# Altium footprint library Connector_FPC.PcbLib: 36 footprints (part 1 of 3)
Each footprint in its own frame and in the unit in brackets; x right, y up, seen from the top. Pads: shape width x height; smd on the part's side, far side on the other; paste and mask are expansions set on the pad; w line width, h text height; cw(c..) or ccw(c..) is an arc to the next point about the centre after c.
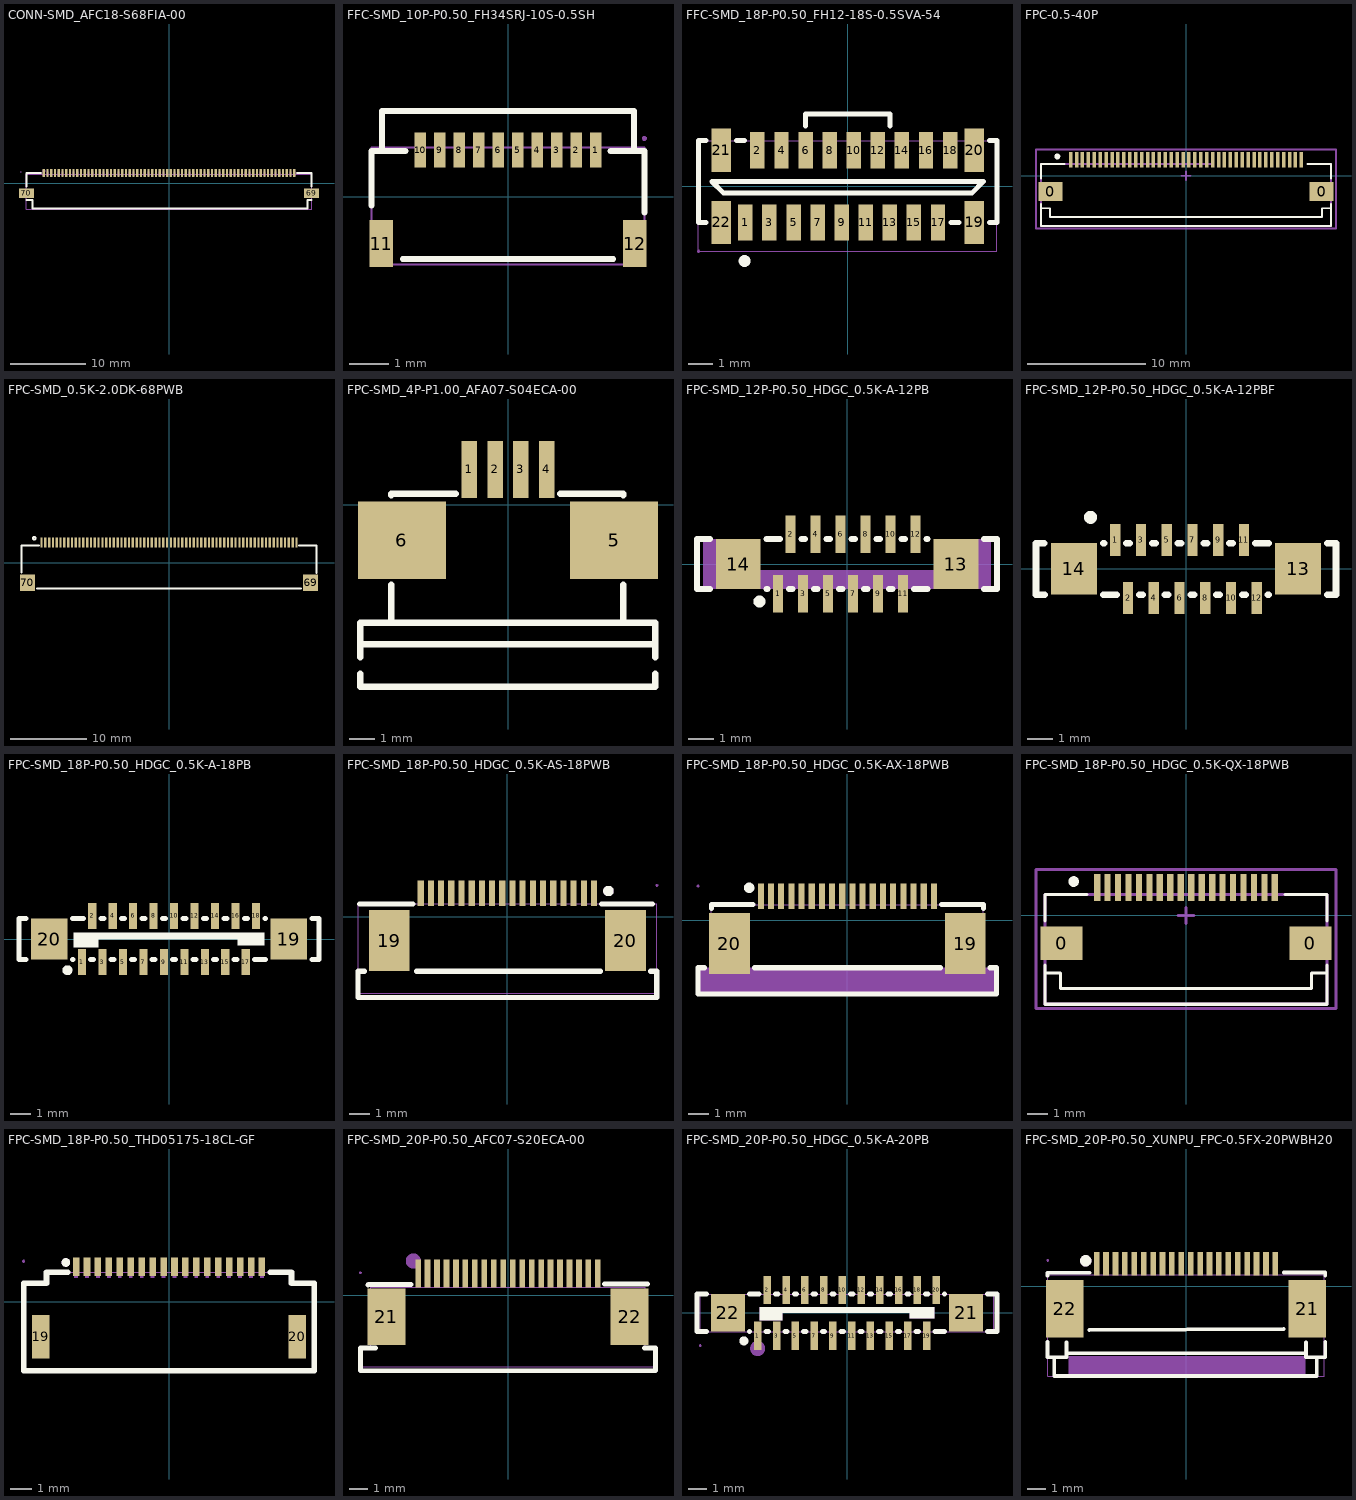
[diagram p0: the footprints below, top view; thin cyan lines are the x and y axes]

## CONN-SMD_AFC18-S68FIA-00 [mm]
pads (70):
  rect 0.3x1.1 smd paste+0 mask+0.05: 1(-16.75,1.35) 2(-16.25,1.35) 3(-15.75,1.35) 4(-15.25,1.35) 5(-14.75,1.35) 6(-14.25,1.35) 7(-13.75,1.35) 8(-13.25,1.35) 9(-12.75,1.35) 10(-12.25,1.35) 11(-11.75,1.35) 12(-11.25,1.35) 13(-10.75,1.35) 14(-10.25,1.35) 15(-9.75,1.35) 16(-9.25,1.35) 17(-8.75,1.35) 18(-8.25,1.35) 19(-7.75,1.35) 20(-7.25,1.35) 21(-6.75,1.35) 22(-6.25,1.35) 23(-5.75,1.35) 24(-5.25,1.35) 25(-4.75,1.35) 26(-4.25,1.35) 27(-3.75,1.35) 28(-3.25,1.35) 29(-2.75,1.35) 30(-2.25,1.35) 31(-1.75,1.35) 32(-1.25,1.35) 33(-0.75,1.35) 34(-0.25,1.35) 35(0.25,1.35) 36(0.75,1.35) 37(1.25,1.35) 38(1.75,1.35) 39(2.25,1.35) 40(2.75,1.35) 41(3.25,1.35) 42(3.75,1.35) 43(4.25,1.35) 44(4.75,1.35) 45(5.25,1.35) 46(5.75,1.35) 47(6.25,1.35) 48(6.75,1.35) 49(7.25,1.35) 50(7.75,1.35) 51(8.25,1.35) 52(8.75,1.35) 53(9.25,1.35) 54(9.75,1.35) 55(10.25,1.35) 56(10.75,1.35) 57(11.25,1.35) 58(11.75,1.35) 59(12.25,1.35) 60(12.75,1.35) 61(13.25,1.35) 62(13.75,1.35) 63(14.25,1.35) 64(14.75,1.35) 65(15.25,1.35) 66(15.75,1.35) 67(16.25,1.35) 68(16.75,1.35)
  rect 2x1.3 smd paste+0 mask+0.05: 69(19.05,-1.35) 70(-19.05,-1.35)
Top Overlay:
  lines w0.254: -19.05,-2.231 -18.25,-2.231 -18.25,-3.4 18.5,-3.4 18.5,-2.231 19.05,-2.231 ; -19.05,-0.469 -19.05,1.35 -17.131,1.35 ; 17.131,1.35 19.05,1.35 19.05,-0.469
Mechanical 2:
  circle w0.2: c-16.715,1.627 r0.1
Mechanical 5:
  lines w0.051: -19.05,-3.473 -19.05,1.187 19.05,1.187 19.05,-3.473 -19.05,-3.473
Mechanical 7:
  region: -19.764,1.487 -19.764,1.462 -19.8,1.427 -19.849,1.427 -19.884,1.462 -19.884,1.487 -19.884,1.512 -19.849,1.547 -19.8,1.547 -19.764,1.512 -19.764,1.487
Mechanical 8:
  drawing of 70 lines, arcs and shapes, not listed
3D body "1.step": height 1.78, standoff 0, extent -19.85,-3.455 19.85,1.505

## FFC-SMD_10P-P0.50_FH34SRJ-10S-0.5SH [mm]
pads (12):
  rect 0.3x0.9 smd: 1(2.25,1.2) 2(1.75,1.2) 3(1.25,1.2) 4(0.75,1.2) 5(0.25,1.2) 6(-0.25,1.2) 7(-0.75,1.2) 8(-1.25,1.2) 9(-1.75,1.2) 10(-2.25,1.2)
  rect 0.6x1.2 smd: 11(-3.25,-1.2) 12(3.25,-1.2)
Top Overlay:
  lines w0.15: -3.5,-0.224 -3.5,1.176 -2.631,1.176 ; -3.234,1.176 -3.234,2.2 3.234,2.2 3.234,1.176 ; -2.7,-1.6 2.7,-1.6 ; 2.631,1.176 3.5,1.176 3.5,-0.4
Mechanical 15:
  region: 3.56,1.5 3.56,1.475 3.525,1.44 3.475,1.44 3.44,1.475 3.44,1.5 3.44,1.525 3.475,1.56 3.525,1.56 3.56,1.525 3.56,1.5
  region: 3.15,-0.8 3.35,-0.8 3.35,-1.6 3.15,-1.6
  region: -3.35,-0.8 -3.15,-0.8 -3.15,-1.6 -3.35,-1.6
  region: -2.325,1.5 -2.175,1.5 -2.175,0.9 -2.325,0.9
  region: -1.825,1.5 -1.675,1.5 -1.675,0.9 -1.825,0.9
  region: -1.325,1.5 -1.175,1.5 -1.175,0.9 -1.325,0.9
  region: -0.825,1.5 -0.675,1.5 -0.675,0.9 -0.825,0.9
  region: -0.325,1.5 -0.175,1.5 -0.175,0.9 -0.325,0.9
  region: 0.175,1.5 0.325,1.5 0.325,0.9 0.175,0.9
  region: 0.675,1.5 0.825,1.5 0.825,0.9 0.675,0.9
  region: 1.175,1.5 1.325,1.5 1.325,0.9 1.175,0.9
  region: 1.675,1.5 1.825,1.5 1.825,0.9 1.675,0.9
  region: 2.175,1.5 2.325,1.5 2.325,0.9 2.175,0.9
  lines w0.051: -3.5,-1.74 -3.5,1.26 3.5,1.26 3.5,-1.74 -3.5,-1.74
3D body "1.step": height 1.45, standoff 0, extent -3.5,-1.7 3.5,1.5

## FFC-SMD_18P-P0.50_FH12-18S-0.5SVA-54 [mm]
pads (22):
  rect 0.6x1.5 smd mask+0.15: 1(-4.25,-1.5) 2(-3.75,1.5) 3(-3.25,-1.5) 4(-2.75,1.5) 5(-2.25,-1.5) 6(-1.75,1.5) 7(-1.25,-1.5) 8(-0.75,1.5) 9(-0.25,-1.5) 10(0.25,1.5) 11(0.75,-1.5) 12(1.25,1.5) 13(1.75,-1.5) 14(2.25,1.5) 15(2.75,-1.5) 16(3.25,1.5) 17(3.75,-1.5) 18(4.25,1.5)
  rect 0.8x1.8 smd mask+0.15: 19(5.25,-1.5) 20(5.25,1.5) 21(-5.25,1.5) 22(-5.25,-1.5)
Top Overlay:
  circle w0.254: c-4.281,-3.1 r0.119
  lines w0.203: -5.881,-1.5 -6.2,-1.5 -6.2,1.9 -5.881,1.9 ; -4.619,1.9 -4.281,1.9 ; -1.75,2.5 -1.75,3 1.75,3 1.75,2.5 ; 4.281,-1.5 4.619,-1.5 ; 5.881,-1.5 6.2,-1.5 6.2,1.9 5.881,1.9 ; -5.635,0.2 -5.165,-0.27 5.165,-0.27 5.635,0.2 -5.635,0.2
Mechanical 15:
  region: 4.325,1.05 4.175,1.05 4.175,1.9 4.325,1.9
  region: 3.825,-1.9 3.675,-1.9 3.675,-1.05 3.825,-1.05
  region: 3.325,1.05 3.175,1.05 3.175,1.9 3.325,1.9
  region: 2.825,-1.9 2.675,-1.9 2.675,-1.05 2.825,-1.05
  region: 2.325,1.05 2.175,1.05 2.175,1.9 2.325,1.9
  region: 1.825,-1.9 1.675,-1.9 1.675,-1.05 1.825,-1.05
  region: 1.325,1.05 1.175,1.05 1.175,1.9 1.325,1.9
  region: 0.825,-1.9 0.675,-1.9 0.675,-1.05 0.825,-1.05
  region: 0.325,1.05 0.175,1.05 0.175,1.9 0.325,1.9
  region: -0.175,-1.9 -0.325,-1.9 -0.325,-1.05 -0.175,-1.05
  region: -0.675,1.05 -0.825,1.05 -0.825,1.9 -0.675,1.9
  region: -1.175,-1.9 -1.325,-1.9 -1.325,-1.05 -1.175,-1.05
  region: -1.675,1.05 -1.825,1.05 -1.825,1.9 -1.675,1.9
  region: -2.175,-1.9 -2.325,-1.9 -2.325,-1.05 -2.175,-1.05
  region: -2.675,1.05 -2.825,1.05 -2.825,1.9 -2.675,1.9
  region: -3.175,-1.9 -3.325,-1.9 -3.325,-1.05 -3.175,-1.05
  region: -3.675,1.05 -3.825,1.05 -3.825,1.9 -3.675,1.9
  region: -4.175,-1.9 -4.325,-1.9 -4.325,-1.05 -4.175,-1.05
  region: 5.35,-1.9 5.15,-1.9 5.15,-0.9 5.35,-0.9
  region: 5.35,0.9 5.15,0.9 5.15,1.9 5.35,1.9
  region: -5.15,0.9 -5.35,0.9 -5.35,1.9 -5.15,1.9
  region: -5.15,-1.9 -5.35,-1.9 -5.35,-0.9 -5.15,-0.9
  region: -6.26,-2.7 -6.259,-2.724 -6.224,-2.758 -6.176,-2.758 -6.141,-2.724 -6.14,-2.7 -6.141,-2.676 -6.176,-2.642 -6.224,-2.642 -6.259,-2.676 -6.26,-2.7
  lines w0.051: -6.2,-2.7 -6.2,1.9 6.2,1.9 6.2,-2.7 -6.2,-2.7
3D body "Tl0J-FPC1.stp": height 5.5, standoff 0, extent -6.162,-1.822 6.238,1.978

## FPC-0.5-40P [mm]
height 3.16
pads (42):
  rect 2x1.6 smd: 0(-11.45,-1.337) 0(11.45,-1.337)
  rect 0.3x1.3 smd: 1(-9.75,1.338) 2(-9.25,1.338) 3(-8.75,1.338) 4(-8.25,1.338) 5(-7.75,1.338) 6(-7.25,1.338) 7(-6.75,1.338) 8(-6.25,1.338) 9(-5.75,1.338) 10(-5.25,1.338) 11(-4.75,1.338) 12(-4.25,1.338) 13(-3.75,1.338) 14(-3.25,1.338) 15(-2.75,1.338) 16(-2.25,1.338) 17(-1.75,1.338) 18(-1.25,1.338) 19(-0.75,1.338) 20(-0.25,1.338) 21(0.25,1.338) 22(0.75,1.338) 23(1.25,1.338) 24(1.75,1.338) 25(2.25,1.338) 26(2.75,1.338) 27(3.25,1.338) 28(3.75,1.338) 29(4.25,1.338) 30(4.75,1.338) 31(5.25,1.338) 32(5.75,1.338) 33(6.25,1.338) 34(6.75,1.338) 35(7.25,1.338) 36(7.75,1.338) 37(8.25,1.338) 38(8.75,1.338) 39(9.25,1.338) 40(9.75,1.338)
Top Overlay:
  circle w0.254: c-10.875,1.625 r0.125
  lines w0.152: -12.25,-2.75 -11.5,-2.75 -11.5,-3.5 -8,-3.5 11.5,-3.5 11.5,-2.75 12.25,-2.75 ; -12.25,-2.375 -12.25,-4.25 12.25,-4.25 12.25,-2.375 ; -12.25,-0.25 -12.25,1 -10.25,1 ; 11.25,1 10.25,1 12.25,1 12.25,-0.25
Mechanical 13:
  lines w0.152: 2.25,1 -12.25,1 -12.25,-4.25 12.25,-4.25 12.25,1
Mechanical 15:
  lines w0.152: -0.375,0 0.375,0 ; 0,-0.375 0,0.375 ; -12.675,-4.45 -12.675,2.2 12.675,2.2 12.675,-4.45 -12.675,-4.45
3D body: height 2, standoff 0.2, extent -12.25,-4.25 12.25,1

## FPC-SMD_0.5K-2.0DK-68PWB [mm]
pads (70):
  rect 0.3x1.3 smd paste+0 mask+0.05: 1(-16.75,2.65) 2(-16.25,2.65) 3(-15.75,2.65) 4(-15.25,2.65) 5(-14.75,2.65) 6(-14.25,2.65) 7(-13.75,2.65) 8(-13.25,2.65) 9(-12.75,2.65) 10(-12.25,2.65) 11(-11.75,2.65) 12(-11.25,2.65) 13(-10.75,2.65) 14(-10.25,2.65) 15(-9.75,2.65) 16(-9.25,2.65) 17(-8.75,2.65) 18(-8.25,2.65) 19(-7.75,2.65) 20(-7.25,2.65) 21(-6.75,2.65) 22(-6.25,2.65) 23(-5.75,2.65) 24(-5.25,2.65) 25(-4.75,2.65) 26(-4.25,2.65) 27(-3.75,2.65) 28(-3.25,2.65) 29(-2.75,2.65) 30(-2.25,2.65) 31(-1.75,2.65) 32(-1.25,2.65) 33(-0.75,2.65) 34(-0.25,2.65) 35(0.25,2.65) 36(0.75,2.65) 37(1.25,2.65) 38(1.75,2.65) 39(2.25,2.65) 40(2.75,2.65) 41(3.25,2.65) 42(3.75,2.65) 43(4.25,2.65) 44(4.75,2.65) 45(5.25,2.65) 46(5.75,2.65) 47(6.25,2.65) 48(6.75,2.65) 49(7.25,2.65) 50(7.75,2.65) 51(8.25,2.65) 52(8.75,2.65) 53(9.25,2.65) 54(9.75,2.65) 55(10.25,2.65) 56(10.75,2.65) 57(11.25,2.65) 58(11.75,2.65) 59(12.25,2.65) 60(12.75,2.65) 61(13.25,2.65) 62(13.75,2.65) 63(14.25,2.65) 64(14.75,2.65) 65(15.25,2.65) 66(15.75,2.65) 67(16.25,2.65) 68(16.75,2.65)
  rect 2x2.2 smd paste+0 mask+0.05: 69(18.61,-2.65) 70(-18.61,-2.65)
Top Overlay:
  circle w0.254: c-17.708,3.204 r0.18
  lines w0.254: -19.4,-1.332 -19.4,2.25 -17.104,2.25 ; -17.379,-3.4 17.379,-3.4 ; 17.104,2.25 19.4,2.25 19.4,-1.361

## FPC-SMD_4P-P1.00_AFA07-S04ECA-00 [mm]
pads (6):
  rect 0.6x2.2 smd: 1(-1.5,1.365) 2(-0.5,1.365) 3(0.499,1.365) 4(1.499,1.365)
  rect 3.4x3 smd: 5(4.1,-1.365) 6(-4.1,-1.365)
Top Overlay:
  lines w0.254: -5.718,-6.543 -5.718,-7.043 5.69,-7.043 ; -5.718,-5.893 -5.718,-5.393 -5.718,-4.563 ; -5.718,-5.394 4.48,-5.394 ; -5.718,-4.554 5.69,-4.554 ; -4.518,-4.554 -4.518,-3.096 ; -4.518,0.367 -4.518,0.435 -2.031,0.435 ; 2.031,0.435 4.45,0.435 ; 4.459,-4.554 4.459,-3.096 ; 4.459,0.366 4.459,0.435 ; 4.49,-5.394 5.69,-5.394 ; 5.69,-7.044 5.69,-6.544 ; 5.69,-5.894 5.69,-5.394 ; 5.69,-4.564 5.69,-5.394

## FPC-SMD_12P-P0.50_HDGC_0.5K-A-12PB [mm]
pads (14):
  rect 0.4x1.5 smd: 1(-2.75,-1.2) 2(-2.25,1.2) 3(-1.75,-1.2) 4(-1.25,1.2) 5(-0.75,-1.2) 6(-0.25,1.2) 7(0.25,-1.2) 8(0.75,1.2) 9(1.25,-1.2) 10(1.75,1.2) 11(2.25,-1.2) 12(2.75,1.2)
  rect 1.8x2 smd: 13(4.35,0) 14(-4.35,0)
Top Overlay:
  circle w0.254: c-3.5,-1.5 r0.114
  lines w0.254: -5.481,-1 -6,-1 -6,1 -5.5,1 -5.481,1 ; -3.219,-1 -3.181,-1 ; -3.219,1 -2.681,1 ; -2.319,-1 -2.181,-1 ; -1.819,1 -1.681,1 ; -1.319,-1 -1.181,-1 ; -0.819,1 -0.681,1 ; -0.319,-1 -0.181,-1 ; 0.181,1 0.319,1 ; 0.681,-1 0.819,-1 ; 1.181,1 1.319,1 ; 1.681,-1 1.819,-1 ; 2.181,1 2.319,1 ; 2.681,-1 3.219,-1 ; 3.181,1 3.219,1 ; 5.481,-1.001 6,-1.001 6,1.001 ; 5.481,0.999 6,0.999
Mechanical 15:
  region: -5.75,1 -5.75,-1 5.75,-1 5.75,1 3.5,1 3.5,-0.25 -3.5,-0.25 -3.5,1
3D body "FPC1.stp": height 4.5, standoff 0, extent -5.825,-1.75 5.825,1.75

## FPC-SMD_12P-P0.50_HDGC_0.5K-A-12PBF [mm]
pads (14):
  rect 0.4x1.25 smd: 1(-2.75,1.125) 2(-2.25,-1.125) 3(-1.75,1.125) 4(-1.25,-1.125) 5(-0.75,1.125) 6(-0.25,-1.125) 7(0.25,1.125) 8(0.75,-1.125) 9(1.25,1.125) 10(1.75,-1.125) 11(2.25,1.125) 12(2.75,-1.125)
  rect 1.8x2 smd: 13(4.35,0) 14(-4.35,0)
Top Overlay:
  circle w0.254: c-3.707,2.003 r0.127
  lines w0.254: -5.5,1 -5.825,1 -5.825,-1 -5.481,-1 ; -3.219,1 -3.181,1 ; -3.181,-1 -3.219,-1 -2.681,-1 ; -2.319,1 -2.181,1 ; -1.819,-1 -1.681,-1 ; -1.319,1 -1.181,1 ; -0.819,-1 -0.681,-1 ; -0.319,1 -0.181,1 ; 0.181,-1 0.319,-1 ; 0.681,1 0.819,1 ; 1.181,-1 1.319,-1 ; 1.681,1 1.819,1 ; 2.181,-1 2.319,-1 ; 2.681,1 2.819,1 3.219,1 ; 3.181,-1 3.219,-1 ; 5.481,-1 5.825,-1 5.825,1 5.481,1
3D body "FPC2.stp": height 4.5, standoff 0, extent -5.825,-1.75 5.825,1.75

## FPC-SMD_18P-P0.50_HDGC_0.5K-A-18PB [mil]
pads (20):
  rect 15.7x49.2 smd mask+1.97: 1(-167.3,-44.3) 2(-147.6,44.3) 3(-128,-44.3) 4(-108.3,44.3) 5(-88.6,-44.3) 6(-68.9,44.3) 7(-49.2,-44.3) 8(-29.5,44.3) 9(-9.8,-44.3) 10(9.8,44.3) 11(29.5,-44.3) 12(49.2,44.3) 13(68.9,-44.3) 14(88.6,44.3) 15(108.3,-44.3) 16(127.9,44.3) 17(147.6,-44.3) 18(167.3,44.3)
  rect 70.9x78.7 smd mask+1.97: 19(230.3,0) 20(-230.3,0)
Top Overlay:
  circle w10: c-195.3,-60 r4.5
  region: 183.07,11.81 183.07,-11.81 131.89,-11.81 131.89,0 -135.83,0 -135.83,-15.75 -183.07,-15.75 -183.07,11.81 183.07,11.81
  lines w10: -274.9,-39.4 -288.4,-39.4 -288.4,39.4 -275.6,39.4 -274.9,39.4 ; -185.8,-39.4 -184.3,-39.4 ; -185.8,39.4 -164.6,39.4 ; -150.4,-39.4 -144.9,-39.4 ; -130.7,39.4 -125.2,39.4 ; -111,-39.4 -105.6,-39.4 ; -91.3,39.4 -85.9,39.4 ; -71.6,-39.4 -66.2,-39.4 ; -51.9,39.4 -46.5,39.4 ; -32.2,-39.4 -26.8,-39.4 ; -12.6,39.4 -7.1,39.4 ; 7.1,-39.4 12.5,-39.4 ; 26.8,39.4 32.2,39.4 ; 46.5,-39.4 51.9,-39.4 ; 66.2,39.4 71.6,39.4 ; 85.9,-39.4 91.3,-39.4 ; 105.6,39.4 111,39.4 ; 125.2,-39.4 130.7,-39.4 ; 144.9,39.4 150.3,39.4 ; 164.6,-39.4 170,-39.4 185.8,-39.4 ; 184.3,39.4 185.8,39.4 ; 274.8,-39.4 288.4,-39.4 288.4,39.4 274.8,39.4
3D body "FPC1.stp": height 173.23, standoff 0, extent -287.4,-59.06 287.4,59.06

## FPC-SMD_18P-P0.50_HDGC_0.5K-AS-18PWB [mm]
pads (20):
  rect 0.3x1.25 smd paste+0 mask+0.05: 1(4.25,1.162) 2(3.75,1.162) 3(3.25,1.162) 4(2.75,1.162) 5(2.25,1.162) 6(1.75,1.162) 7(1.25,1.162) 8(0.75,1.162) 9(0.25,1.162) 10(-0.25,1.162) 11(-0.75,1.162) 12(-1.25,1.162) 13(-1.75,1.162) 14(-2.25,1.162) 15(-2.75,1.162) 16(-3.25,1.162) 17(-3.75,1.162) 18(-4.25,1.162)
  rect 2x3 smd paste+0 mask+0.05: 19(-5.79,-1.162) 20(5.79,-1.162)
Top Overlay:
  circle w0.254: c4.953,1.27 r0.127
  lines w0.254: -7.239,0.635 -4.631,0.635 ; -7.021,-2.665 -7.32,-2.665 -7.32,-3.957 7.32,-3.957 7.32,-2.665 7.021,-2.665 ; -4.445,-2.667 4.559,-2.665 ; 4.631,0.635 7.112,0.635
Mechanical 6:
  circle w0.254: c4.953,1.27 r0.127
Mechanical 15:
  region: 7.385,1.543 7.385,1.568 7.35,1.603 7.3,1.603 7.265,1.568 7.265,1.543 7.265,1.519 7.3,1.483 7.35,1.483 7.385,1.519 7.385,1.543
  region: -4.35,1.543 -4.15,1.543 -4.15,0.543 -4.35,0.543
  region: -3.85,1.543 -3.65,1.543 -3.65,0.543 -3.85,0.543
  region: -3.35,1.543 -3.15,1.543 -3.15,0.543 -3.35,0.543
  region: -2.85,1.543 -2.65,1.543 -2.65,0.543 -2.85,0.543
  region: -2.35,1.543 -2.15,1.543 -2.15,0.543 -2.35,0.543
  region: -1.85,1.543 -1.65,1.543 -1.65,0.543 -1.85,0.543
  region: -1.35,1.543 -1.15,1.543 -1.15,0.543 -1.35,0.543
  region: -0.85,1.543 -0.65,1.543 -0.65,0.543 -0.85,0.543
  region: -0.35,1.543 -0.15,1.543 -0.15,0.543 -0.35,0.543
  region: 0.15,1.543 0.35,1.543 0.35,0.543 0.15,0.543
  region: 0.65,1.543 0.85,1.543 0.85,0.543 0.65,0.543
  region: 1.15,1.543 1.35,1.543 1.35,0.543 1.15,0.543
  region: 1.65,1.543 1.85,1.543 1.85,0.543 1.65,0.543
  region: 2.15,1.543 2.35,1.543 2.35,0.543 2.15,0.543
  region: 2.65,1.543 2.85,1.543 2.85,0.543 2.65,0.543
  region: 3.15,1.543 3.35,1.543 3.35,0.543 3.15,0.543
  region: 3.65,1.543 3.85,1.543 3.85,0.543 3.65,0.543
  region: 4.15,1.543 4.35,1.543 4.35,0.543 4.15,0.543
  region: 5.04,0.088 6.54,0.088 6.54,-2.412 5.04,-2.412
  region: -6.54,0.088 -5.04,0.088 -5.04,-2.412 -6.54,-2.412
  lines w0.051: -7.325,-3.757 -7.325,0.643 7.325,0.643 7.325,-3.757 -7.325,-3.757
3D body "上.stp": height 2.02, standoff 0, extent -7.325,-3.756 7.325,1.544

## FPC-SMD_18P-P0.50_HDGC_0.5K-AX-18PWB [mm]
pads (20):
  rect 0.3x1.25 smd paste+0 mask+0.05: 1(-4.25,1.162) 2(-3.75,1.162) 3(-3.25,1.162) 4(-2.75,1.162) 5(-2.25,1.162) 6(-1.75,1.162) 7(-1.25,1.162) 8(-0.75,1.162) 9(-0.25,1.162) 10(0.25,1.162) 11(0.75,1.162) 12(1.25,1.162) 13(1.75,1.162) 14(2.25,1.162) 15(2.75,1.162) 16(3.25,1.162) 17(3.75,1.162) 18(4.25,1.162)
  rect 2x3 smd paste+0 mask+0.05: 19(5.79,-1.162) 20(-5.79,-1.162)
Top Overlay:
  circle w0.254: c-4.823,1.584 r0.127
  lines w0.254: -7.021,-2.34 -7.33,-2.34 -7.33,-3.64 7.33,-3.64 7.33,-2.34 7.021,-2.34 ; -6.68,0.569 -6.68,0.77 -4.631,0.77 ; -4.559,-2.34 4.559,-2.34 ; 4.631,0.77 6.68,0.77 6.68,0.569
Mechanical 6:
  region: 7.35,-2.35 7.35,-3.65 -7.3,-3.65 -7.3,-2.35 7.35,-2.35
Mechanical 15:
  region: -6.675,0.238 -4.8,0.238 -4.8,-2.338 -6.675,-2.338
  region: 4.8,0.238 6.675,0.238 6.675,-2.338 4.8,-2.338
  region: 4.15,1.662 4.35,1.662 4.35,0.662 4.15,0.662
  region: 3.65,1.662 3.85,1.662 3.85,0.662 3.65,0.662
  region: 3.15,1.662 3.35,1.662 3.35,0.662 3.15,0.662
  region: 2.65,1.662 2.85,1.662 2.85,0.662 2.65,0.662
  region: 2.15,1.662 2.35,1.662 2.35,0.662 2.15,0.662
  region: 1.65,1.662 1.85,1.662 1.85,0.662 1.65,0.662
  region: 1.15,1.662 1.35,1.662 1.35,0.662 1.15,0.662
  region: 0.65,1.662 0.85,1.662 0.85,0.662 0.65,0.662
  region: 0.15,1.662 0.35,1.662 0.35,0.662 0.15,0.662
  region: -0.35,1.662 -0.15,1.662 -0.15,0.662 -0.35,0.662
  region: -0.85,1.662 -0.65,1.662 -0.65,0.662 -0.85,0.662
  region: -1.35,1.662 -1.15,1.662 -1.15,0.662 -1.35,0.662
  region: -1.85,1.662 -1.65,1.662 -1.65,0.662 -1.85,0.662
  region: -2.35,1.662 -2.15,1.662 -2.15,0.662 -2.35,0.662
  region: -2.85,1.662 -2.65,1.662 -2.65,0.662 -2.85,0.662
  region: -3.35,1.662 -3.15,1.662 -3.15,0.662 -3.35,0.662
  region: -3.85,1.662 -3.65,1.662 -3.65,0.662 -3.85,0.662
  region: -4.35,1.662 -4.15,1.662 -4.15,0.662 -4.35,0.662
  region: -7.265,1.662 -7.265,1.687 -7.3,1.722 -7.35,1.722 -7.385,1.687 -7.385,1.662 -7.385,1.638 -7.35,1.602 -7.3,1.602 -7.265,1.638 -7.265,1.662
  lines w0.051: -6.675,-3.638 6.675,-3.638 ; -6.675,-3.638 -6.675,-3.638 ; -6.675,-3.638 -7.325,-3.638 -7.325,-2.338 -6.675,-2.338 -6.675,0.762 6.675,0.762 6.675,-2.338 7.325,-2.338 7.325,-3.638 6.675,-3.638 ; 6.675,-3.638 6.675,-3.638
3D body "下.stp": height 2.03, standoff 0, extent -7.325,-3.922 7.325,1.378

## FPC-SMD_18P-P0.50_HDGC_0.5K-QX-18PWB [mm]
height 3.16
pads (20):
  rect 2x1.6 smd: 0(-5.95,-1.338) 0(5.95,-1.338)
  rect 0.3x1.3 smd: 1(-4.25,1.338) 2(-3.75,1.338) 3(-3.25,1.338) 4(-2.75,1.338) 5(-2.25,1.338) 6(-1.75,1.338) 7(-1.25,1.338) 8(-0.75,1.338) 9(-0.25,1.338) 10(0.25,1.338) 11(0.75,1.338) 12(1.25,1.338) 13(1.75,1.338) 14(2.25,1.338) 15(2.75,1.338) 16(3.25,1.338) 17(3.75,1.338) 18(4.25,1.338)
Top Overlay:
  circle w0.254: c-5.375,1.625 r0.125
  lines w0.152: -6.75,-2.75 -6,-2.75 -6,-3.5 -2.5,-3.5 6,-3.5 6,-2.75 6.75,-2.75 ; -6.75,-2.375 -6.75,-4.25 6.75,-4.25 6.75,-2.375 ; -6.75,-0.25 -6.75,1 -4.75,1 ; 5.75,1 4.75,1 6.75,1 6.75,-0.25
Mechanical 13:
  lines w0.152: -6.75,-4.25 -6.75,1 6.75,1 6.75,-4.25 -6.75,-4.25
Mechanical 15:
  lines w0.152: -0.375,0 0.375,0 ; 0,-0.375 0,0.375 ; -7.175,-4.45 -7.175,2.2 7.175,2.2 7.175,-4.45 -7.175,-4.45
3D body "FPC1.stp": height 2.01, standoff 0, extent -6.7,-4.266 6.7,1.634

## FPC-SMD_18P-P0.50_THD05175-18CL-GF [mil]
pads (20):
  rect 11.8x33.5 smd mask+2: 1(-167.3,63) 2(-147.6,63) 3(-127.9,63) 4(-108.3,63) 5(-88.6,63) 6(-68.9,63) 7(-49.2,63) 8(-29.5,63) 9(-9.8,63) 10(9.9,63) 11(29.5,63) 12(49.2,63) 13(68.9,63) 14(88.6,63) 15(108.3,63) 16(128,63) 17(147.7,63) 18(167.3,63)
  rect 31.5x78.7 smd mask+2: 19(-230.7,-63) 20(230.7,-63)
Top Overlay:
  circle w7.9: c-185.7,70.7 r3.9
  lines w10: -182.3,53.2 -220.5,53.2 -220.5,33.5 -261.8,33.5 -261.8,-123.9 261.8,-123.9 261.8,33.6 ; 182.3,53.2 220.5,53.2 220.5,33.5 261.7,33.5 261.7,33.3
Mechanical 6:
  circle w7.9: c-185.7,70.7 r3.9
Mechanical 15:
  region: -259.4,72.8 -259.4,73.79 -260.81,75.2 -262.79,75.2 -264.2,73.79 -264.2,72.8 -264.2,71.81 -262.79,70.4 -260.81,70.4 -259.4,71.81 -259.4,72.8
  region: -170.3,72.8 -164.4,72.8 -164.4,43.2 -170.3,43.2
  region: -150.6,72.8 -144.7,72.8 -144.7,43.2 -150.6,43.2
  region: -130.9,72.8 -125,72.8 -125,43.2 -130.9,43.2
  region: -111.2,72.8 -105.3,72.8 -105.3,43.2 -111.2,43.2
  region: -91.5,72.8 -85.6,72.8 -85.6,43.2 -91.5,43.2
  region: -71.8,72.8 -65.9,72.8 -65.9,43.2 -71.8,43.2
  region: -52.2,72.8 -46.3,72.8 -46.3,43.2 -52.2,43.2
  region: -32.5,72.7 -26.6,72.7 -26.6,43.2 -32.5,43.2
  region: -12.8,72.7 -6.9,72.7 -6.9,43.2 -12.8,43.2
  region: 6.9,72.7 12.8,72.7 12.8,43.2 6.9,43.2
  region: 26.6,72.7 32.5,72.7 32.5,43.2 26.6,43.2
  region: 46.3,72.7 52.2,72.7 52.2,43.2 46.3,43.2
  region: 66,72.7 71.9,72.7 71.9,43.2 66,43.2
  region: 85.6,72.7 91.5,72.7 91.5,43.2 85.6,43.2
  region: 105.3,72.7 111.2,72.7 111.2,43.2 105.3,43.2
  region: 125,72.7 130.9,72.7 130.9,43.2 125,43.2
  region: 144.7,72.7 150.6,72.7 150.6,43.2 144.7,43.2
  region: 164.4,72.7 170.3,72.7 170.3,43.2 164.4,43.2
  region: 234.6,-88.6 226.8,-88.6 226.8,-37.4 234.6,-37.4
  region: -234.6,-37.4 -226.8,-37.4 -226.8,-88.6 -234.6,-88.6
  lines w2: -261.8,-123.9 261.8,-123.9 261.8,33 261.8,33.5 220.5,33.5 220.5,53.2 -220.5,53.2 -220.5,33.5 -261.8,33.5 -261.8,-123.9
3D body "FPC1.stp": height 68.89, standoff 0, extent -261.8,-124.02 261.8,72.82

## FPC-SMD_20P-P0.50_AFC07-S20ECA-00 [mm]
pads (22):
  rect 0.3x1.5 smd paste+0.051: 1(-4.751,1.141) 2(-4.251,1.141) 3(-3.751,1.141) 4(-3.251,1.141) 5(-2.751,1.141) 6(-2.251,1.141) 7(-1.751,1.141) 8(-1.251,1.141) 9(-0.752,1.141) 10(-0.251,1.141) 11(0.249,1.141) 12(0.749,1.141) 13(1.249,1.141) 14(1.749,1.141) 15(2.245,1.14) 16(2.748,1.14) 17(3.248,1.142) 18(3.748,1.141) 19(4.248,1.141) 20(4.75,1.138)
  rect 2x3 smd paste+0.051: 21(-6.427,-1.141) 22(6.427,-1.142)
Top Overlay:
  lines w0.254: -7.4,0.537 -7.374,0.562 -5.114,0.562 ; -7,-2.8 -7.8,-2.8 -7.8,-4 7.8,-4 7.8,-2.8 7.2,-2.8 ; 5.097,0.587 7.383,0.587
Mechanical 4:
  circle w0.4: c-5,1.8 r0.2
Mechanical 7:
  lines w0.051: -7.8,-3.792 -7.8,-2.8 -7.25,-2.8 -7.25,0.408 -5.4,0.408 7.25,0.408 7.25,-2.8 7.8,-2.8 7.8,-3.792 -7.8,-3.792
Mechanical 9:
  region: -7.86,1.183 -7.86,1.158 -7.825,1.123 -7.775,1.123 -7.74,1.158 -7.74,1.183 -7.74,1.207 -7.775,1.243 -7.825,1.243 -7.86,1.207 -7.86,1.183
Mechanical 10:
  region: -7.25,-0.041 -5.527,-0.041 -5.527,-2.241 -7.25,-2.241
  region: 5.527,-0.042 7.25,-0.042 7.25,-2.242 5.527,-2.242
  region: -4.851,0.383 -4.851,1.183 -4.651,1.183 -4.651,0.383
  region: -4.351,0.383 -4.351,1.183 -4.151,1.183 -4.151,0.383
  region: -3.851,0.383 -3.851,1.183 -3.651,1.183 -3.651,0.383
  region: -3.351,0.383 -3.351,1.183 -3.151,1.183 -3.151,0.383
  region: -2.851,0.383 -2.851,1.183 -2.651,1.183 -2.651,0.383
  region: -2.351,0.383 -2.351,1.183 -2.151,1.183 -2.151,0.383
  region: -1.851,0.383 -1.851,1.183 -1.651,1.183 -1.651,0.383
  region: -1.351,0.383 -1.351,1.183 -1.151,1.183 -1.151,0.383
  region: -0.852,0.383 -0.852,1.183 -0.652,1.183 -0.652,0.383
  region: -0.351,0.383 -0.351,1.183 -0.151,1.183 -0.151,0.383
  region: 0.149,0.383 0.149,1.183 0.349,1.183 0.349,0.383
  region: 0.649,0.383 0.649,1.183 0.849,1.183 0.849,0.383
  region: 1.149,0.383 1.149,1.183 1.349,1.183 1.349,0.383
  region: 1.649,0.383 1.649,1.183 1.849,1.183 1.849,0.383
  region: 2.145,0.383 2.145,1.183 2.345,1.183 2.345,0.383
  region: 2.648,0.383 2.648,1.183 2.848,1.183 2.848,0.383
  region: 3.148,0.383 3.148,1.183 3.348,1.183 3.348,0.383
  region: 3.648,0.383 3.648,1.183 3.848,1.183 3.848,0.383
  region: 4.148,0.383 4.148,1.183 4.348,1.183 4.348,0.383
  region: 4.65,0.383 4.65,1.183 4.85,1.183 4.85,0.383
3D body "4.step": height 2.01, standoff 0, extent -7.8,-3.9 7.8,1.3

## FPC-SMD_20P-P0.50_HDGC_0.5K-A-20PB [mm]
pads (22):
  rect 0.4x1.5 smd mask+0.05: 1(-4.75,-1.225) 2(-4.25,1.225) 3(-3.75,-1.225) 4(-3.25,1.225) 5(-2.75,-1.225) 6(-2.25,1.225) 7(-1.75,-1.225) 8(-1.25,1.225) 9(-0.75,-1.225) 10(-0.25,1.225) 11(0.25,-1.225) 12(0.75,1.225) 13(1.25,-1.225) 14(1.75,1.225) 15(2.25,-1.225) 16(2.75,1.225) 17(3.25,-1.225) 18(3.75,1.225) 19(4.25,-1.225) 20(4.75,1.225)
  rect 1.8x2 smd mask+0.05: 21(6.35,0) 22(-6.35,0)
Top Overlay:
  circle w0.254: c-5.5,-1.5 r0.114
  region: 4.65,0.3 4.65,-0.3 3.35,-0.3 3.35,0 -3.45,0 -3.45,-0.4 -4.65,-0.4 -4.65,0.3 4.65,0.3
  lines w0.254: -7.481,-1 -8,-1 -8,1 -7.5,1 -7.481,1 ; -5.219,-1 -5.181,-1 ; -5.219,1 -4.681,1 ; -4.319,-1 -4.181,-1 ; -3.819,1 -3.681,1 ; -3.319,-1 -3.181,-1 ; -2.819,1 -2.681,1 ; -2.319,-1 -2.181,-1 ; -1.819,1 -1.681,1 ; -1.319,-1 -1.181,-1 ; -0.819,1 -0.681,1 ; -0.319,-1 -0.181,-1 ; 0.181,1 0.319,1 ; 0.681,-1 0.819,-1 ; 1.181,1 1.319,1 ; 1.681,-1 1.819,-1 ; 2.181,1 2.319,1 ; 2.681,-1 2.819,-1 ; 3.181,1 3.319,1 ; 3.681,-1 3.819,-1 ; 4.181,1 4.319,1 ; 4.681,-1.001 5.219,-1.001 ; 5.181,1.001 5.219,1.001 ; 7.481,-1.001 8,-1.001 8,1.001 7.481,1.001
Mechanical 6:
  circle w0.4: c-4.762,-1.903 r0.2
  region: 4.65,0.3 4.65,-0.3 3.35,-0.3 3.35,0 -3.45,0 -3.45,-0.4 -4.65,-0.4 -4.65,0.3 4.65,0.3
Mechanical 15:
  region: 5.55,0.9 7.15,0.9 7.15,-0.9 5.55,-0.9
  region: -7.15,0.9 -5.55,0.9 -5.55,-0.9 -7.15,-0.9
  region: -4.85,-0.9 -4.65,-0.9 -4.65,-1.75 -4.85,-1.75
  region: -4.35,1.75 -4.15,1.75 -4.15,0.9 -4.35,0.9
  region: -3.85,-0.9 -3.65,-0.9 -3.65,-1.75 -3.85,-1.75
  region: -3.35,1.75 -3.15,1.75 -3.15,0.9 -3.35,0.9
  region: -2.85,-0.9 -2.65,-0.9 -2.65,-1.75 -2.85,-1.75
  region: -2.35,1.75 -2.15,1.75 -2.15,0.9 -2.35,0.9
  region: -1.85,-0.9 -1.65,-0.9 -1.65,-1.75 -1.85,-1.75
  region: -1.35,1.75 -1.15,1.75 -1.15,0.9 -1.35,0.9
  region: -0.85,-0.9 -0.65,-0.9 -0.65,-1.75 -0.85,-1.75
  region: -0.35,1.75 -0.15,1.75 -0.15,0.9 -0.35,0.9
  region: 0.15,-0.9 0.35,-0.9 0.35,-1.75 0.15,-1.75
  region: 0.65,1.75 0.85,1.75 0.85,0.9 0.65,0.9
  region: 1.15,-0.9 1.35,-0.9 1.35,-1.75 1.15,-1.75
  region: 1.65,1.75 1.85,1.75 1.85,0.9 1.65,0.9
  region: 2.15,-0.9 2.35,-0.9 2.35,-1.75 2.15,-1.75
  region: 2.65,1.75 2.85,1.75 2.85,0.9 2.65,0.9
  region: 3.15,-0.9 3.35,-0.9 3.35,-1.75 3.15,-1.75
  region: 3.65,1.75 3.85,1.75 3.85,0.9 3.65,0.9
  region: 4.15,-0.9 4.35,-0.9 4.35,-1.75 4.15,-1.75
  region: 4.65,1.75 4.85,1.75 4.85,0.9 4.65,0.9
  region: -7.765,-1.75 -7.765,-1.725 -7.8,-1.69 -7.85,-1.69 -7.885,-1.725 -7.885,-1.75 -7.885,-1.775 -7.85,-1.81 -7.8,-1.81 -7.765,-1.775 -7.765,-1.75
  lines w0.051: -7.825,-1 7.825,-1 7.825,1 -7.825,1 -7.825,-1
3D body "FPC1.stp": height 4.5, standoff 0, extent -7.825,-1.75 7.825,1.75

## FPC-SMD_20P-P0.50_XUNPU_FPC-0.5FX-20PWBH20 [mm]
pads (22):
  rect 0.3x1.25 smd paste+0 mask+0.05: 1(-4.75,1.2) 2(-4.25,1.2) 3(-3.75,1.2) 4(-3.25,1.2) 5(-2.75,1.2) 6(-2.25,1.2) 7(-1.75,1.2) 8(-1.25,1.2) 9(-0.75,1.2) 10(-0.25,1.2) 11(0.25,1.2) 12(0.75,1.2) 13(1.25,1.2) 14(1.75,1.2) 15(2.25,1.2) 16(2.75,1.2) 17(3.25,1.2) 18(3.75,1.2) 19(4.25,1.2) 20(4.75,1.2)
  rect 2x3.05 smd paste+0 mask+0.05: 21(6.45,-1.2) 22(-6.45,-1.2)
Top Overlay:
  circle w0.3: c-5.334,1.354 r0.15
  lines w0.2: -7.366,-2.956 -7.366,-3.775 -6.35,-3.775 -6.35,-2.975 ; -7.366,0.556 -7.366,0.719 -5.131,0.719 ; -7,-3.775 -7,-4.775 6.95,-4.775 6.95,-3.775 ; -6.35,-3.559 6.382,-3.559 ; -5.15,-2.325 5.2,-2.275 ; 5.2,0.725 7.4,0.725 7.398,0.556 ; 6.382,-2.975 6.382,-3.775 7.398,-3.775 ; 7.398,-3.775 7.398,-2.956
Mechanical 4:
  circle w0.3: c-5.334,1.354 r0.15
  region: -6.223,-4.742 -6.223,-3.726 6.35,-3.726 6.35,-4.742 0.508,-4.742
Mechanical 7:
  lines w0.051: -7.35,-4.775 7.35,-4.775 7.35,0.625 -7.35,0.625 -7.35,-4.775
Mechanical 8:
  region: 4.65,0.615 4.65,0.835 4.85,0.835 4.85,0.615
  region: 4.15,0.615 4.15,0.835 4.35,0.835 4.35,0.615
  region: 3.65,0.615 3.65,0.835 3.85,0.835 3.85,0.615
  region: 3.15,0.615 3.15,0.835 3.35,0.835 3.35,0.615
  region: 2.65,0.615 2.65,0.835 2.85,0.835 2.85,0.615
  region: 2.15,0.615 2.15,0.835 2.35,0.835 2.35,0.615
  region: 1.65,0.615 1.65,0.835 1.85,0.835 1.85,0.615
  region: 1.15,0.615 1.15,0.835 1.35,0.835 1.35,0.615
  region: 0.65,0.615 0.65,0.835 0.85,0.835 0.85,0.615
  region: 0.15,0.615 0.15,0.835 0.35,0.835 0.35,0.615
  region: -0.35,0.615 -0.35,0.835 -0.15,0.835 -0.15,0.615
  region: -0.85,0.615 -0.85,0.835 -0.65,0.835 -0.65,0.615
  region: -1.35,0.615 -1.35,0.835 -1.15,0.835 -1.15,0.615
  region: -1.85,0.615 -1.85,0.835 -1.65,0.835 -1.65,0.615
  region: -2.35,0.615 -2.35,0.835 -2.15,0.835 -2.15,0.615
  region: -2.85,0.615 -2.85,0.835 -2.65,0.835 -2.65,0.615
  region: -3.35,0.615 -3.35,0.835 -3.15,0.835 -3.15,0.615
  region: -3.85,0.615 -3.85,0.835 -3.65,0.835 -3.65,0.615
  region: -4.35,0.615 -4.35,0.835 -4.15,0.835 -4.15,0.615
  region: -4.85,0.615 -4.85,0.835 -4.65,0.835 -4.65,0.615
Mechanical 9:
  region: -7.41,1.375 -7.41,1.35 -7.375,1.315 -7.325,1.315 -7.29,1.35 -7.29,1.375 -7.29,1.4 -7.325,1.435 -7.375,1.435 -7.41,1.4 -7.41,1.375
Mechanical 10:
  region: 4.65,0.825 4.65,1.375 4.85,1.375 4.85,0.825
  region: 4.15,0.825 4.15,1.375 4.35,1.375 4.35,0.825
  region: 3.65,0.825 3.65,1.375 3.85,1.375 3.85,0.825
  region: 3.15,0.825 3.15,1.375 3.35,1.375 3.35,0.825
  region: 2.65,0.825 2.65,1.375 2.85,1.375 2.85,0.825
  region: 2.15,0.825 2.15,1.375 2.35,1.375 2.35,0.825
  region: 1.65,0.825 1.65,1.375 1.85,1.375 1.85,0.825
  region: 1.15,0.825 1.15,1.375 1.35,1.375 1.35,0.825
  region: 0.65,0.825 0.65,1.375 0.85,1.375 0.85,0.825
  region: 0.15,0.825 0.15,1.375 0.35,1.375 0.35,0.825
  region: -0.35,0.825 -0.35,1.375 -0.15,1.375 -0.15,0.825
  region: -0.85,0.825 -0.85,1.375 -0.65,1.375 -0.65,0.825
  region: -1.35,0.825 -1.35,1.375 -1.15,1.375 -1.15,0.825
  region: -1.85,0.825 -1.85,1.375 -1.65,1.375 -1.65,0.825
  region: -2.35,0.825 -2.35,1.375 -2.15,1.375 -2.15,0.825
  region: -2.85,0.825 -2.85,1.375 -2.65,1.375 -2.65,0.825
  region: -3.35,0.825 -3.35,1.375 -3.15,1.375 -3.15,0.825
  region: -3.85,0.825 -3.85,1.375 -3.65,1.375 -3.65,0.825
  region: -4.35,0.825 -4.35,1.375 -4.15,1.375 -4.15,0.825
  region: -4.85,0.825 -4.85,1.375 -4.65,1.375 -4.65,0.825
  region: -7.225,-0.225 -5.675,-0.225 -5.675,-2.225 -7.225,-2.225
  region: 5.675,-0.225 7.225,-0.225 7.225,-2.225 5.675,-2.225